# Altium footprint library PTS645SM43SMTR92LFS.PcbLib: 1 footprints
Each footprint in its own frame and in the unit in brackets; x right, y up, seen from the top. Pads: shape width x height; smd on the part's side, far side on the other; paste and mask are expansions set on the pad; w line width, h text height; cw(c..) or ccw(c..) is an arc to the next point about the centre after c.
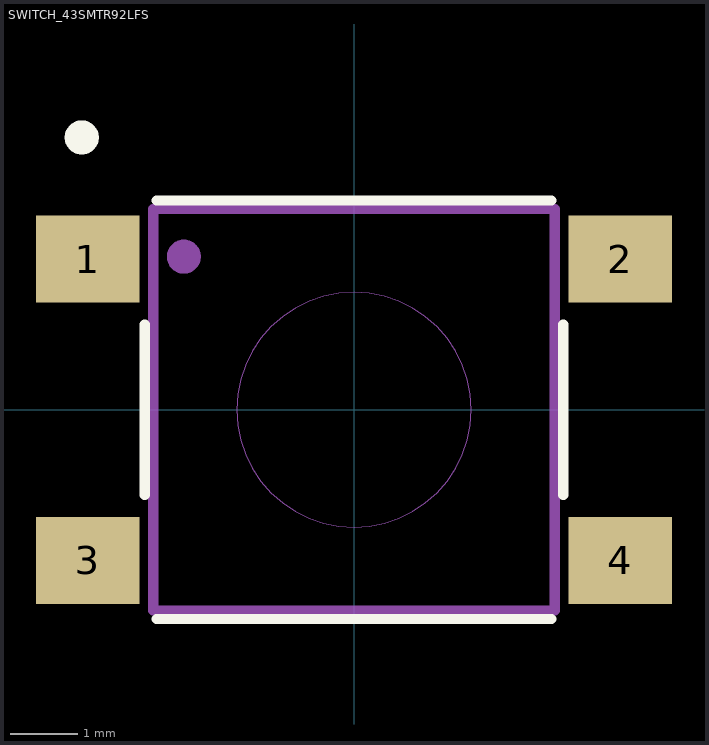
[diagram p0: the footprint, top view; thin cyan lines are the x and y axes]

## SWITCH_43SMTR92LFS [mm]
pads (4):
  rect 1.549x1.295 smd: 1(-3.975,2.25) 2(3.975,2.25) 3(-3.975,-2.25) 4(3.975,-2.25)
Top Overlay:
  lines w0.152: -3.124,-1.27 -3.124,1.27 ; -2.946,-3.124 2.946,-3.124 ; -2.946,3.124 2.946,3.124 ; 3.124,-1.27 3.124,1.27
  lines w0.254: -4.191,4.064 cw(c-4.064,4.064) -3.937,4.064 cw(c-4.064,4.064) -4.191,4.064
Bottom Overlay:
  lines w0.254: -4.191,4.064 cw(c-4.064,4.064) -3.937,4.064 cw(c-4.064,4.064) -4.191,4.064
Assembly Top:
  lines w0: -1.753,0 cw(c0,0) 1.753,0 cw(c0,0) -1.753,0
  lines w0.152: -2.997,-2.997 -2.997,2.997 2.997,2.997 2.997,-2.997 -2.997,-2.997
  lines w0.254: -2.667,2.286 cw(c-2.54,2.286) -2.413,2.286 cw(c-2.54,2.286) -2.667,2.286
3D body "step_temp.STEP": height 4.3, standoff 0, extent -4.5,-3 4.5,3